# EAGLE library part CONN_9 (library Sirokko)
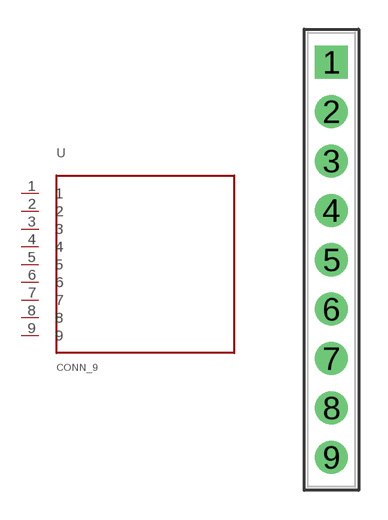
[diagram p1: symbol with the pads of SOCKET_MAX31856; footprint SOCKET_MAX31856]

Designator prefix -

## CONN_9  [SOCKET_MAX31856]
1  1  pas
2  2  pas
3  3  pas
4  4  pas
5  5  pas
6  6  pas
7  7  pas
8  8  pas
9  9  pas

## Footprint SOCKET_MAX31856 (pad centres in mm)
Samtec SSW-109-01-T-S. Holes per official SSW-S footprint; module body envelope 2.8 mm.
drill 1.04 pad 1.7 square: 1 0,0
drill 1.04 pad 1.7: 2 0,-2.54; 3 0,-5.08; 4 0,-7.62; 5 0,-10.16; 6 0,-12.7; 7 0,-15.24; 8 0,-17.78; 9 0,-20.32